# Altium schematic symbol library CL05A105KO5NNNC.SchLib: 1 symbol
Pins are listed as number, name and electrical type; pins without a type are passive.

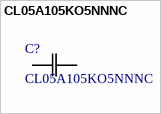
[diagram p0: symbol CL05A105KO5NNNC]

## CL05A105KO5NNNC
designator C?
Description; Manufacturer_Name: Samsung; Copyright: Copyright (C) 2025 Ultra Librarian. All rights reserved.; Manufacturer_Part_Number: CL05A105KO5NNNC
footprint CAP_CL05_SAM
pins: 1, 2